# Altium footprint library Master.PcbLib: 178 footprints (part 8 of 12)
Each footprint in its own frame and in the unit in brackets; x right, y up, seen from the top. Pads: shape width x height; smd on the part's side, far side on the other; paste and mask are expansions set on the pad; w line width, h text height; cw(c..) or ccw(c..) is an arc to the next point about the centre after c.
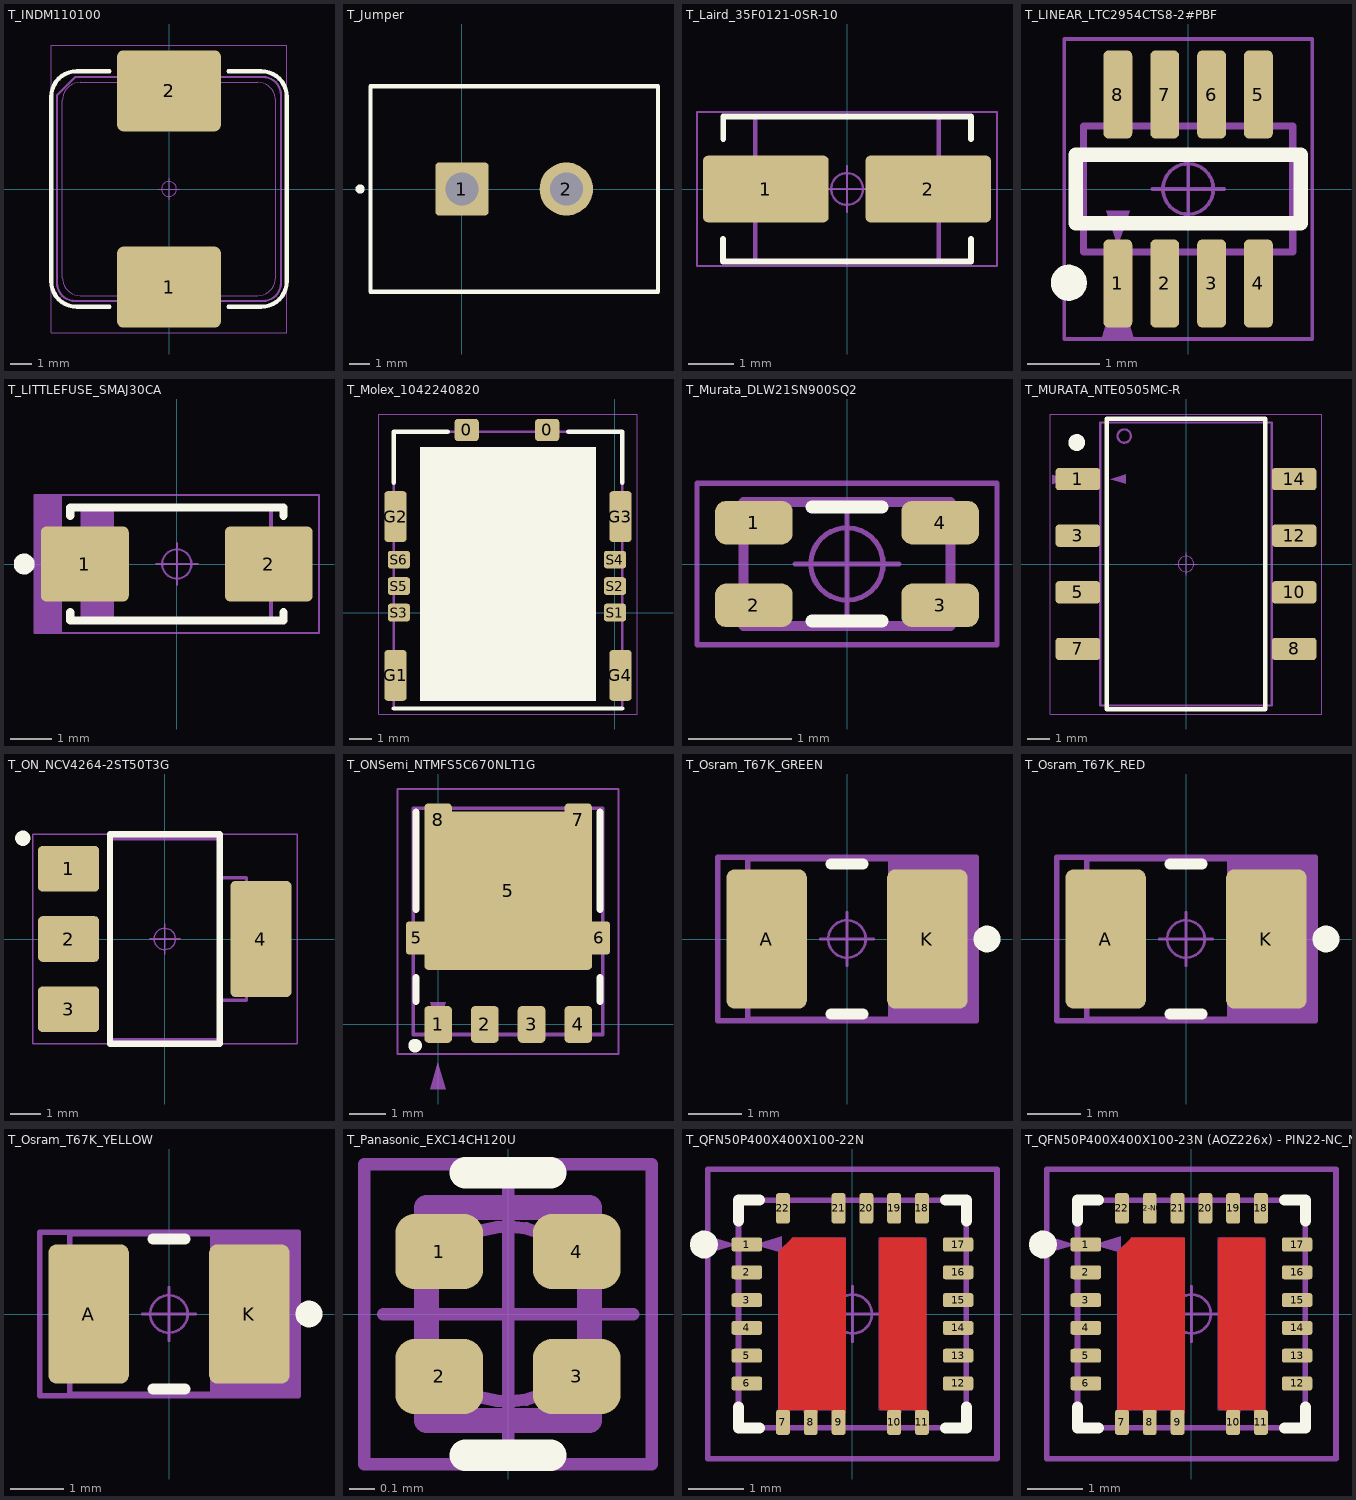
[diagram p7: the footprints below, top view; thin cyan lines are the x and y axes]

## T_INDM110100 [mm]
pads (2):
  rrect15% 4.86x3.8 smd: 1(0,-4.6) 2(0,4.6)
Top Overlay:
  lines w0.2: -2.794,-5.523 -4.32,-5.523 cw(c-4.32,-4.32) -5.523,-4.32 -5.523,4.32 cw(c-4.32,4.32) -4.32,5.523 -2.794,5.523 ; 2.794,-5.523 4.32,-5.523 ccw(c4.32,-4.32) 5.523,-4.32 5.523,4.343 ; 2.794,5.523 4.32,5.523 cw(c4.32,4.32) 5.523,4.32
Top Component Outline:
  lines w0.05: -5.52,-6.731 -5.52,6.731 5.52,6.731 5.52,-6.731 -5.52,-6.731
Top 3D Body:
  lines w0.001: -5,-4.15 ccw(c-4.15,-4.15) -4.15,-5 4.15,-5 ccw(c4.15,-4.15) 5,-4.15 5,4.15 ccw(c4.15,4.15) 4.15,5 -4.15,5 ccw(c-4.15,4.15) -5,4.15 -5,-4.15 ; -1.6,3.2 1.4,3.2 1.4,5.5 -1.6,5.5 -1.6,3.2 ; -1.5,-5.5 -1.5,-3.2 1.5,-3.2 1.5,-5.5 -1.5,-5.5
Top Component Center:
  circle w0.05: c0,0 r0.35
  lines w0.05: -0.5,0 0.5,0 ; 0,-0.5 0,0.5
Top Dimensions:
  lines w0.1: -5.25,-4.4 ccw(c-4.4,-4.4) -4.4,-5.25 4.4,-5.25 ccw(c4.4,-4.4) 5.25,-4.4 5.25,4.4 ccw(c4.4,4.4) 4.4,5.25 -4.4,5.25 -5.25,4.4 -5.25,-4.4
Top Assembly:
  text ".Designator" at -2.075,7.175 h0.75
3D body "User Library-SRP 1038A.step": height 3.8, standoff -0.2, extent -5,-5.2 5,5.2

## T_Jumper [mm]
pads (2):
  rrect15% 2.6x2.6 hole 1.6: 1(0,0)
  round 2.6 hole 1.6: 2(5.08,0)
Top Overlay:
  circle w0.25: c-4.96,0 r0.1
  lines w0.2: -4.46,-5 9.54,-5 9.54,5 -4.46,5 -4.46,-5
Top Component Outline:
  lines w0.05: -4.46,-5 -4.46,5 9.54,5 9.54,-5 -4.46,-5
Top 3D Body:
  lines w0.001: -4.46,-5 -4.46,5 9.54,5 9.54,-5 -4.46,-5
Top Component Center:
  circle w0.05: c0,0 r0.35
  lines w0.05: -0.5,0 0.5,0 ; 0,-0.5 0,0.5
Top Dimensions:
  lines w0.1: -4.46,-5 9.54,-5 9.54,5 -4.46,5 -4.46,-5
Top Assembly:
  text ".Designator" at 0.54,5.5 h0.75

## T_Laird_35F0121-0SR-10 [mm]
pads (2):
  rrect15% 2.77x1.47 smd: 1(-1.79,0) 2(1.79,0)
Top Overlay:
  lines w0.127: -2.732,-1.102 -2.732,-1.599 2.73,-1.599 2.73,-1.104 ; -2.729,1.104 -2.729,1.599 2.73,1.599 2.73,1.104
Top Component Outline:
  lines w0.05: -3.306,-1.695 -3.306,1.695 3.305,1.695 3.305,-1.695 -3.306,-1.695
Top 3D Body:
  lines w0.001: -2.025,-1.6 -2.025,1.6 2.025,1.6 2.025,-1.6 -2.025,-1.6
Top Component Center:
  circle w0.05: c0,0 r0.35
  lines w0.05: -0.5,0 0.5,0 ; 0,-0.5 0,0.5
Top Dimensions:
  lines w0.1: -2.025,-1.6 2.025,-1.6 2.025,1.6 -2.025,1.6 -2.025,-1.6
Top Assembly:
  text ".Designator" at -1.575,2.025 h0.75
3D body "test-14.step": height 3.05, standoff 0, extent -2.3,-1.59 2.3,1.59

## T_LINEAR_LTC2954CTS8-2#PBF [mm]
pads (8):
  rrect35% 0.4x1.22 smd: 1(-0.975,-1.31) 2(-0.325,-1.31) 3(0.325,-1.31) 4(0.975,-1.31) 5(0.975,1.31) 6(0.325,1.31) 7(-0.325,1.31) 8(-0.975,1.31)
Top Overlay:
  circle w0.25: c-1.655,-1.3 r0.125
  lines w0.2: -1.56,-0.475 -1.56,0.475 1.56,0.475 1.56,-0.475 -1.56,-0.475
Top Component Outline:
  region: -0.762,-2.05 -0.975,-1.34 -1.188,-2.05
  lines w0.05: -1.72,-2.08 1.72,-2.08 ; -1.72,-2.07 -1.72,2.08 1.72,2.08 1.72,-2.07
Top 3D Body:
  lines w0.001: -1.45,-0.875 1.45,-0.875 1.45,0.875 -1.45,0.875 -1.45,-0.875
Top Component Center:
  circle w0.05: c0,0 r0.35
  lines w0.05: -0.5,0 0.5,0 ; 0,-0.5 0,0.5
Top Dimensions:
  region: -0.975,-0.785 -1.137,-0.3 -0.813,-0.3
  lines w0.1: -1.45,-0.875 1.45,-0.875 1.45,0.875 -1.45,0.875 -1.45,-0.875
Top Assembly:
  text ".Designator" at -1.905,2.388 h0.75
3D body "test-15.step": height 1, standoff 0, extent -1.45,-1.4 1.45,1.4

## T_LITTLEFUSE_SMAJ30CA [mm]
pads (2):
  rrect15% 2.1x1.8 smd: 1(-2.2,0) 2(2.2,0)
Top Overlay:
  circle w0.25: c-3.65,0 r0.125
  lines w0.2: -2.55,-1.15 -2.55,-1.35 2.55,-1.35 2.55,-1.15 ; -2.55,1.15 -2.55,1.35 2.55,1.35 2.55,1.15
Top Component Outline:
  rectangle: -3.4,-1.65 -2.775,1.65
  lines w0.05: -2.775,-1.65 -2.775,1.65 ; -3.4,-1.65 3.4,-1.65 3.4,1.65 -3.4,1.65 -3.4,-1.65
Top 3D Body:
  lines w0.001: -2.25,-1.395 2.25,-1.395 2.25,1.395 -2.25,1.395 -2.25,-1.395
Top Component Center:
  circle w0.05: c0,0 r0.35
  lines w0.05: -0.5,0 0.5,0 ; 0,-0.5 0,0.5
Top Dimensions:
  lines w0.1: -2.25,-1.332 -2.25,1.375 2.25,1.375 2.25,-1.375 -2.25,-1.375 -2.25,1.284 -2.202,1.332 ; -2.152,-1.332 -2.152,1.332 ; -2.052,-1.332 -2.052,1.332 ; -1.952,-1.332 -1.952,1.332 ; -1.852,-1.332 -1.852,1.332 ; -1.752,-1.332 -1.752,1.332 ; -1.652,-1.332 -1.652,1.332 ; -1.552,-1.332 -1.552,1.332
Top Assembly:
  text ".Designator" at -1.675,1.975 h0.75
3D body "test-16.step": height 2.29, standoff 0, extent -2.52,-1.395 2.52,1.395

## T_Molex_1042240820 [mm]
height 1.21
pads (12):
  rrect30% 1.1x1 smd paste+0 mask+0.05: 0(-6.725,8.275) 0(-3.075,8.275)
  rrect30% 1x2.3 smd paste+0 mask+0.05: G1(-9.95,-2.85) G2(-9.95,4.35) G3(0.25,4.35) G4(0.25,-2.85)
  rrect30% 1x0.8 smd mask+0.05: S1(0,0) S2(0,1.2) S3(-9.8,0) S4(0,2.4) S5(-9.8,1.2) S6(-9.8,2.4)
Top Layer keep-out:
  rectangle: -5.45,-4 -4.25,-1.1
  rectangle: -8,-4 -6.8,-1.1
  rectangle: -2.9,-4 -1.7,-1.1
  rectangle: -2.875,3.5 -1.675,6.4
  rectangle: -7.975,3.5 -6.775,6.4
  rectangle: -5.425,3.5 -4.225,6.4
Top Overlay:
  rectangle: -8.85,-4 -0.85,7.5
  lines w0.2: -10.025,-4.35 0.325,-4.35 ; -10.025,5.875 -10.025,8.2 -7.575,8.2 ; -2.125,8.2 0.325,8.2 0.325,5.875
Top Component Outline:
  lines w0.05: -10.7,-4.6 1,-4.6 1,9 -10.7,9 -10.7,-4.6
Top Component Center:
  circle w0.05: c-4.825,1.8 r0.35
  lines w0.05: -5.325,1.8 -4.325,1.8 ; -4.825,1.3 -4.825,2.3
Top Dimensions:
  lines w0.1: -10.025,-4.35 -10.025,8.2 0.325,8.2 0.325,-4.35 -10.025,-4.35
Top Assembly:
  text ".Designator" at -5.125,1 h0.75
3D body "1042240820.stp": height 1.1, standoff -0.01, extent -10.025,-4.35 0.325,8.2

## T_Murata_DLW21SN900SQ2 [mm]
pads (4):
  rrect50% 0.75x0.42 smd: 1(-0.9,0.4) 2(-0.9,-0.4) 3(0.9,-0.4) 4(0.9,0.4)
Top Overlay:
  lines w0.127: -0.34,-0.55 0.34,-0.55 ; -0.34,0.55 0.34,0.55
Top Component Outline:
  lines w0.05: -1.45,-0.78 1.45,-0.78 1.45,0.78 -1.45,0.78 -1.45,-0.78
Top 3D Body:
  lines w0.001: -1,-0.6 1,-0.6 1,0.6 -1,0.6 -1,-0.6
Top Component Center:
  circle w0.05: c0,0 r0.35
  lines w0.05: -0.5,0 0.5,0 ; 0,-0.5 0,0.5
Top Dimensions:
  lines w0.1: -1,-0.6 1,-0.6 1,0.6 -1,0.6 -1,-0.6
Top Assembly:
  text ".Designator" at -1.625,1.05 h0.75
3D body "User Library-EMI Filter DLW21S.STEP": height 1.2, standoff 0, extent -1,-0.6 1,0.6

## T_MURATA_NTE0505MC-R [mm]
pads (8):
  rrect30% 2x1 smd: 1(-4.85,3.81) 3(-4.85,1.27) 5(-4.85,-1.27) 7(-4.85,-3.81) 8(4.85,-3.81) 10(4.85,-1.27) 12(4.85,1.27) 14(4.85,3.81)
Top Overlay:
  circle w0.5: c-4.905,5.45 r0.125
  lines w0.2: -3.56,-6.51 3.56,-6.51 3.56,6.51 -3.56,6.51 -3.56,-6.51
Top Component Outline:
  region: -6.005,3.581 -5.295,3.793 -6.005,4.007
  lines w0.05: -6.08,-6.73 6.08,-6.73 6.08,6.73 -6.08,6.73 -6.08,-6.73
Top 3D Body:
  lines w0.001: -3.85,-6.35 3.85,-6.35 3.85,6.35 -3.85,6.35 -3.85,-6.35
Top Component Center:
  circle w0.05: c0,0 r0.35
  lines w0.05: -0.5,0 0.5,0 ; 0,-0.5 0,0.5
Top Dimensions:
  circle w0.1: c-2.77,5.74 r0.3
  region: -2.695,4.019 -3.405,3.807 -2.695,3.593
  lines w0.1: -3.85,-6.35 3.85,-6.35 3.85,6.35 -3.85,6.35 -3.85,-6.35
Top Assembly:
  text ".Designator" at -2.007,7.087 h0.75
3D body "User Library-NTE0303MC.STEP": height 6.35, standoff -0.25, extent -5.725,-6.348 5.725,6.348

## T_ON_NCV4264-2ST50T3G [mm]
pads (4):
  rrect20% 2x1.5 smd: 1(-3.15,2.3) 2(-3.15,0) 3(-3.15,-2.3)
  rrect15% 2x3.8 smd: 4(3.15,0)
Top Overlay:
  circle w0.25: c-4.65,3.3 r0.125
  lines w0.2: -1.8,-3.43 -1.8,3.43 1.8,3.43 1.8,-3.43 -1.8,-3.43
Top Component Outline:
  lines w0.05: -4.33,-3.43 -4.33,3.43 4.33,3.43 4.33,-3.43 -4.33,-3.43
Top 3D Body:
  lines w0.001: -1.85,-3.251 1.85,-3.251 1.85,3.251 -1.85,3.251 -1.85,-3.251
Top Component Center:
  circle w0.05: c0,0 r0.35
  lines w0.05: -0.5,0 0.5,0 ; 0,-0.5 0,0.5
Top Dimensions:
  lines w0.1: 1.79,-2.006 2.68,-2.006 2.68,2.006 1.79,2.006 ; -1.85,-3.302 -1.85,3.302 1.79,3.302 1.79,-3.302 -1.85,-3.302
Top Assembly:
  text ".Designator" at -1.807,3.912 h0.75
3D body "User Library-SOT223-3.step": height 1.7, standoff 0, extent -3.5,-3.25 3.5,3.25

## T_ONSemi_NTMFS5C670NLT1G [mm]
pads (9):
  rrect30% 0.75x1 smd paste+0 mask+0.05: 1(0,0) 2(1.27,0) 3(2.54,0) 4(3.81,0)
  rrect30% 0.6x0.905 smd paste+0 mask+0.05: 5(-0.575,2.35) 6(4.375,2.35)
  rrect5% 4.56x4.3 smd paste-0.9 mask+0.05: 5(1.905,3.635)
  rrect30% 0.75x0.905 smd paste+0 mask+0.05: 7(3.81,5.56) 8(0,5.56)
Top Overlay:
  circle w0.3: c-0.625,-0.575 r0.035
  lines w0.2: -0.6,0.625 -0.6,1.275 ; -0.6,3.125 -0.6,5.775 ; 4.4,0.625 4.4,1.275 ; 4.4,3.125 4.4,5.775
Top Component Outline:
  region: 0.206,-1.755 -0.006,-1.045 -0.22,-1.755
  lines w0.05: -1.1,-0.8 4.9,-0.8 4.9,6.4 -1.1,6.4 -1.1,-0.8
Top Component Center:
  circle w0.05: c1.9,2.8 r0.35
  lines w0.05: 1.4,2.8 2.4,2.8 ; 1.9,2.3 1.9,3.3
Top Dimensions:
  region: -0.219,0.605 -0.007,-0.105 0.207,0.605
  lines w0.1: -0.675,-0.275 -0.675,5.875 4.475,5.875 4.475,-0.275 -0.675,-0.275
Top Assembly:
  text ".Designator" at 1.375,2.625 h0.75
3D body "NTMFS6B03NT1G--3DModel-STEP-56544.STEP": height 1.1, standoff 0, extent -0.675,-0.275 4.475,5.875

## T_Osram_T67K_GREEN [mm]
pads (2):
  rrect20% 1.5x2.6 smd: A(-1.5,0) K(1.5,0)
Top Overlay:
  circle w0.25: c2.613,0 r0.125
  lines w0.2: -0.3,-1.4 0.3,-1.4 ; -0.3,1.4 0.3,1.4
Top Component Outline:
  rectangle: 1.325,-1.524 2.413,1.524
  lines w0.1: -2.413,-1.524 -2.413,1.524 2.413,1.524 2.413,-1.524 -2.413,-1.524
Top 3D Body:
  lines w0.001: -1.85,-1.5 -1.85,1.5 1.85,1.5 1.85,-1.5 -1.85,-1.5
Top Component Center:
  circle w0.05: c0,0 r0.35
  lines w0.05: -0.5,0 0.5,0 ; 0,-0.5 0,0.5
Top Dimensions:
  rectangle: 0.762,-1.5 1.85,1.5
  lines w0.1: -1.85,-1.5 1.85,-1.5 1.85,1.5 -1.85,1.5 -1.85,-1.5
Top Assembly:
  text ".Designator" at -1.8,1.8 h0.75
3D body "User Library-LHT674_YELLOW.STEP": height 1.95, standoff -0.15, extent -1.85,-1.5 1.85,1.5

## T_Osram_T67K_RED [mm]
pads (2):
  rrect20% 1.5x2.6 smd: A(-1.5,0) K(1.5,0)
Top Overlay:
  circle w0.25: c2.613,0 r0.125
  lines w0.2: -0.3,-1.4 0.3,-1.4 ; -0.3,1.4 0.3,1.4
Top Component Outline:
  rectangle: 1.325,-1.524 2.413,1.524
  lines w0.1: -2.413,-1.524 -2.413,1.524 2.413,1.524 2.413,-1.524 -2.413,-1.524
Top 3D Body:
  lines w0.001: -1.85,-1.5 1.85,-1.5 1.85,1.5 -1.85,1.5 -1.85,-1.5
Top Component Center:
  circle w0.05: c0,0 r0.35
  lines w0.05: -0.5,0 0.5,0 ; 0,-0.5 0,0.5
Top Dimensions:
  rectangle: 0.762,-1.5 1.85,1.5
  lines w0.1: -1.85,-1.5 -1.85,1.5 1.85,1.5 1.85,-1.5 -1.85,-1.5
Top Assembly:
  text ".Designator" at -1.8,1.825 h0.75
3D body "User Library-LHT674_RED.STEP": height 1.95, standoff -0.15, extent -1.85,-1.5 1.85,1.5

## T_Osram_T67K_YELLOW [mm]
pads (2):
  rrect20% 1.5x2.6 smd: A(-1.5,0) K(1.5,0)
Top Overlay:
  circle w0.25: c2.613,0 r0.125
  lines w0.2: -0.3,-1.4 0.3,-1.4 ; -0.3,1.4 0.3,1.4
Top Component Outline:
  rectangle: 1.325,-1.524 2.413,1.524
  lines w0.1: -2.413,-1.524 2.413,-1.524 2.413,1.524 -2.413,1.524 -2.413,-1.524
Top 3D Body:
  lines w0.001: -1.85,-1.5 -1.85,1.5 1.85,1.5 1.85,-1.5 -1.85,-1.5
Top Component Center:
  circle w0.05: c0,0 r0.35
  lines w0.05: -0.5,0 0.5,0 ; 0,-0.5 0,0.5
Top Dimensions:
  rectangle: 0.762,-1.5 1.85,1.5
  lines w0.1: -1.85,-1.5 1.85,-1.5 1.85,1.5 -1.85,1.5 -1.85,-1.5
Top Assembly:
  text ".Designator" at -1.8,1.85 h0.75
3D body "User Library-LHT674_YELL.STEP": height 1.95, standoff -0.15, extent -1.85,-1.5 1.85,1.5

## T_Panasonic_EXC14CH120U [mm]
height 0.45
pads (4):
  rrect50% 0.35x0.3 smd mask+0.05: 1(-0.275,0.25) 2(-0.275,-0.25) 3(0.275,-0.25) 4(0.275,0.25)
Top Overlay:
  lines w0.127: -0.17,-0.565 0.17,-0.565 ; -0.17,0.565 0.17,0.565
Top Component Outline:
  lines w0.05: -0.575,-0.6 0.575,-0.6 0.575,0.6 -0.575,0.6 -0.575,-0.6
Top 3D Body:
  lines w0.01: -0.325,-0.425 -0.325,0.425 0.325,0.425 0.325,-0.425 -0.325,-0.425
Top Component Center:
  circle w0.05: c0,0 r0.35
  lines w0.05: -0.5,0 0.5,0 ; 0,-0.5 0,0.5
Top Dimensions:
  lines w0.1: -0.325,-0.425 0.325,-0.425 0.325,0.425 -0.325,0.425 -0.325,-0.425
Top Assembly:
  text ".Designator" at -0.3,-0.175 h0.6
3D body: height 0.45, standoff 0, extent -0.324,-0.424 0.324,0.424

## T_QFN50P400X400X100-22N [mm]
pads (22):
  rrect35% 0.55x0.25 smd mask+0.051: 1(-1.9,1.25) 2(-1.9,0.75) 3(-1.9,0.25) 4(-1.9,-0.25) 5(-1.9,-0.75) 6(-1.9,-1.25) 12(1.9,-1.25) 13(1.9,-0.75) 14(1.9,-0.25) 15(1.9,0.25) 16(1.9,0.75) 17(1.9,1.25)
  rrect35% 0.25x0.45 smd mask+0.051: 7(-1.25,-1.95) 8(-0.75,-1.95) 9(-0.25,-1.95) 10(0.75,-1.95) 11(1.25,-1.95)
  rrect35% 0.25x0.55 smd mask+0.051: 18(1.25,1.9) 19(0.75,1.9) 20(0.25,1.9) 21(-0.25,1.9) 22(-1.25,1.9)
Top Layer:
  region: -1.3,1.15 -1.307,1.143 -1.318,1.126 -1.326,1.107 -1.33,1.088 -1.33,1.078 -1.33,-1.875 -1.125,-1.875 -1.125,-1.75 -1.125,-1.745 -1.121,-1.736 -1.114,-1.729 -1.105,-1.725 -1.1,-1.725 -0.9,-1.725 -0.895,-1.725 -0.886,-1.729 -0.879,-1.736 -0.875,-1.745 -0.875,-1.75 -0.875,-1.775 -0.625,-1.775 -0.625,-1.75 -0.625,-1.745 -0.621,-1.736 -0.614,-1.729 -0.605,-1.725 -0.6,-1.725 -0.4,-1.725 -0.395,-1.725 -0.386,-1.729 -0.379,-1.736 -0.375,-1.745 -0.375,-1.75 -0.375,-1.775 -0.125,-1.775 -0.125,1.325 -0.125,1.335 -0.133,1.353 -0.147,1.367 -0.165,1.375 -0.175,1.375 -1.05,1.375 -1.056,1.375 -1.068,1.373 -1.079,1.368 -1.088,1.362 -1.093,1.357
  region: 0.525,1.375 0.516,1.375 0.5,1.368 0.487,1.356 0.48,1.339 0.48,1.33 0.48,-1.68 0.48,-1.689 0.487,-1.706 0.499,-1.718 0.516,-1.725 0.525,-1.725 0.6,-1.725 0.605,-1.725 0.614,-1.729 0.621,-1.736 0.625,-1.745 0.625,-1.75 0.625,-1.775 0.875,-1.775 0.875,-1.75 0.875,-1.745 0.879,-1.736 0.886,-1.729 0.895,-1.725 0.9,-1.725 1.1,-1.725 1.105,-1.725 1.114,-1.729 1.121,-1.736 1.125,-1.745 1.125,-1.75 1.125,-1.8 1.255,-1.8 1.27,-1.8 1.297,-1.789 1.319,-1.767 1.33,-1.74 1.33,-1.725 1.33,1.32 1.33,1.331 1.322,1.351 1.306,1.367 1.286,1.375 1.275,1.375
Top Overlay:
  circle w0.25: c-2.671,1.25 r0.125
  lines w0.2: -2.05,-1.676 -2.05,-2.05 -1.676,-2.05 ; -2.05,1.676 -2.05,2.05 -1.676,2.05 ; 1.676,-2.05 2.05,-2.05 2.05,-1.676 ; 1.676,2.05 2.05,2.05 2.05,1.676
Top Paste:
  region: 0.7,1.15 1.125,1.15 1.125,-1.5 0.7,-1.5
  region: -0.975,1.125 -1.075,1.025 -1.075,-1.475 -0.375,-1.475 -0.375,1.125
Top Component Outline:
  region: -2.578,1.1 -2.078,1.25 -2.578,1.4
  lines w0.1: -2.6,-2.6 2.6,-2.6 2.6,2.6 -2.6,2.6 -2.6,-2.6
Top 3D Body:
  lines w0.001: -1.325,1.345 -1.325,1.375 -1.295,1.375 ; -2.05,-2.05 2.05,-2.05 2.05,2.05 -2.05,2.05 -2.05,-2.05 ; -1.325,-1.725 -1.325,1.118 -1.068,1.375 -0.125,1.375 -0.125,-1.725 -1.325,-1.725 ; 0.48,-1.725 1.33,-1.725 1.33,1.375 0.48,1.375 0.48,-1.725
Top Component Center:
  circle w0.05: c0,0 r0.35
  lines w0.05: -0.5,0 0.5,0 ; 0,-0.5 0,0.5
Top Dimensions:
  region: -1.273,1.4 -1.773,1.25 -1.273,1.1
  lines w0.1: -2.05,-2.05 2.05,-2.05 2.05,2.05 -2.05,2.05 -2.05,-2.05
Top Assembly:
  text ".Designator" at -1.75,2.9 h0.75
3D body "test-18.step": height 1, standoff 0, extent -2.051,-2.051 2.051,2.051

## T_QFN50P400X400X100-23N (AOZ226x) - PIN22-NC_NOPASTE - duplicate [mm]
pads (23):
  rrect35% 0.55x0.25 smd mask+0.051: 1(-1.9,1.25) 2(-1.9,0.75) 3(-1.9,0.25) 4(-1.9,-0.25) 5(-1.9,-0.75) 6(-1.9,-1.25) 12(1.9,-1.25) 13(1.9,-0.75) 14(1.9,-0.25) 15(1.9,0.25) 16(1.9,0.75) 17(1.9,1.25)
  rrect35% 0.25x0.45 smd mask+0.051: 7(-1.25,-1.95) 8(-0.75,-1.95) 9(-0.25,-1.95) 10(0.75,-1.95) 11(1.25,-1.95)
  rrect35% 0.25x0.55 smd mask+0.051: 18(1.25,1.9) 19(0.75,1.9) 20(0.25,1.9) 21(-0.25,1.9) 22(-1.25,1.9)
  rrect35% 0.25x0.55 smd paste-0.25 mask+0.051: 22-NC(-0.75,1.9)
Top Layer:
  region: 0.525,1.375 0.516,1.375 0.5,1.368 0.487,1.356 0.48,1.339 0.48,1.33 0.48,-1.68 0.48,-1.689 0.487,-1.706 0.499,-1.718 0.516,-1.725 0.525,-1.725 0.6,-1.725 0.605,-1.725 0.614,-1.729 0.621,-1.736 0.625,-1.745 0.625,-1.75 0.625,-1.775 0.875,-1.775 0.875,-1.75 0.875,-1.745 0.879,-1.736 0.886,-1.729 0.895,-1.725 0.9,-1.725 1.1,-1.725 1.105,-1.725 1.114,-1.729 1.121,-1.736 1.125,-1.745 1.125,-1.75 1.125,-1.8 1.255,-1.8 1.27,-1.8 1.297,-1.789 1.319,-1.767 1.33,-1.74 1.33,-1.725 1.33,1.32 1.33,1.331 1.322,1.351 1.306,1.367 1.286,1.375 1.275,1.375
  region: -1.3,1.15 -1.307,1.143 -1.318,1.126 -1.326,1.107 -1.33,1.088 -1.33,1.078 -1.33,-1.875 -1.125,-1.875 -1.125,-1.75 -1.125,-1.745 -1.121,-1.736 -1.114,-1.729 -1.105,-1.725 -1.1,-1.725 -0.9,-1.725 -0.895,-1.725 -0.886,-1.729 -0.879,-1.736 -0.875,-1.745 -0.875,-1.75 -0.875,-1.775 -0.625,-1.775 -0.625,-1.75 -0.625,-1.745 -0.621,-1.736 -0.614,-1.729 -0.605,-1.725 -0.6,-1.725 -0.4,-1.725 -0.395,-1.725 -0.386,-1.729 -0.379,-1.736 -0.375,-1.745 -0.375,-1.75 -0.375,-1.775 -0.125,-1.775 -0.125,1.325 -0.125,1.335 -0.133,1.353 -0.147,1.367 -0.165,1.375 -0.175,1.375 -1.05,1.375 -1.056,1.375 -1.068,1.373 -1.079,1.368 -1.088,1.362 -1.093,1.357
Top Overlay:
  circle w0.25: c-2.671,1.25 r0.125
  lines w0.2: -2.05,-1.676 -2.05,-2.05 -1.676,-2.05 ; -2.05,1.676 -2.05,2.05 -1.676,2.05 ; 1.676,-2.05 2.05,-2.05 2.05,-1.676 ; 1.676,2.05 2.05,2.05 2.05,1.676
Top Paste:
  region: -0.975,1.125 -1.075,1.025 -1.075,-1.475 -0.375,-1.475 -0.375,1.125
  region: 0.7,1.15 1.125,1.15 1.125,-1.5 0.7,-1.5
Top Component Outline:
  region: -2.578,1.1 -2.078,1.25 -2.578,1.4
  lines w0.1: -2.6,-2.6 -2.6,2.6 2.6,2.6 2.6,-2.6 -2.6,-2.6
Top 3D Body:
  lines w0.001: -1.325,1.345 -1.325,1.375 -1.295,1.375 ; -2.05,-2.05 -2.05,2.05 2.05,2.05 2.05,-2.05 -2.05,-2.05 ; -1.325,-1.725 -0.125,-1.725 -0.125,1.375 -1.068,1.375 -1.325,1.118 -1.325,-1.725 ; 0.48,-1.725 0.48,1.375 1.33,1.375 1.33,-1.725 0.48,-1.725
Top Component Center:
  circle w0.05: c0,0 r0.35
  lines w0.05: -0.5,0 0.5,0 ; 0,-0.5 0,0.5
Top Dimensions:
  region: -1.273,1.4 -1.773,1.25 -1.273,1.1
  lines w0.1: -2.05,-2.05 -2.05,2.05 2.05,2.05 2.05,-2.05 -2.05,-2.05
Top Assembly:
  text ".Designator" at -1.75,2.9 h0.75
3D body "test-18.step": height 1, standoff 0, extent -2.051,-2.051 2.051,2.051